# Altium footprint library AudioMoth 1.1.PCBLIB: 193 footprints (part 8 of 13)
Each footprint in its own frame and in the unit in brackets; x right, y up, seen from the top. Pads: shape width x height; smd on the part's side, far side on the other; paste and mask are expansions set on the pad; w line width, h text height; cw(c..) or ccw(c..) is an arc to the next point about the centre after c.
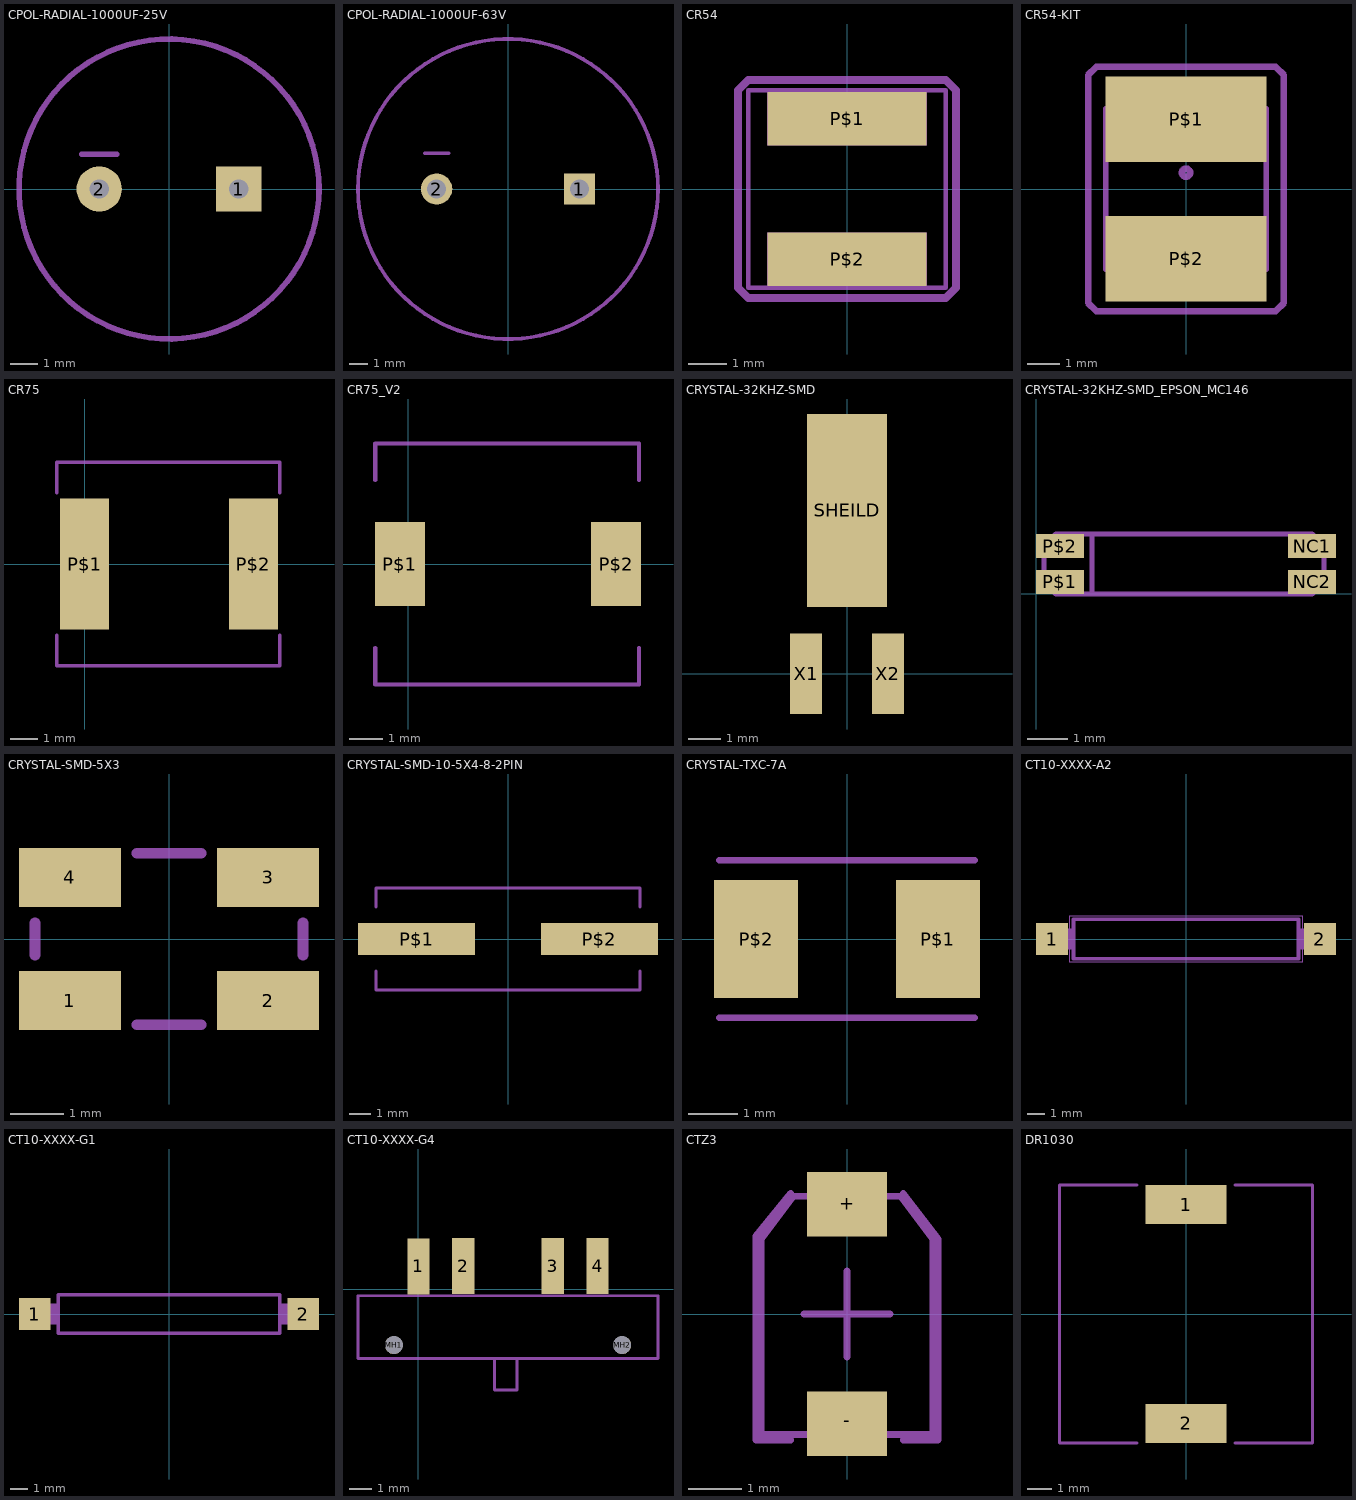
[diagram p7: the footprints below, top view; thin cyan lines are the x and y axes]

## CPOL-RADIAL-1000UF-25V [mil]
pads (2):
  rect 65x65 / inner round 60.05 / far side rect 65x65 hole 27.56: 1(100,0)
  round 65 hole 27.56: 2(-100,0)
tPlace:
  circle w8: c0,0 r215
  lines w8: -125,50 -75,50

## CPOL-RADIAL-1000UF-63V [mil]
pads (2):
  rect 65x65 / inner round 60.05 / far side rect 65x65 hole 40: 1(150,0)
  round 66 hole 40: 2(-150,0)
tPlace:
  circle w8: c0,0 r315
  lines w8: -175,75 -125,75

## CR54 [mm]
pads (2):
  rect 4.2x1.4 smd: P$1(0,1.85) P$2(0,-1.85)
tDocu:
  region: -2.1,1.15 -2.1,2.55 2.1,2.55 2.1,1.15
  region: -2.1,-2.55 -2.1,-1.15 2.1,-1.15 2.1,-2.55
  lines w0.127: -2.6,-2.6 -2.6,2.6 2.6,2.6 2.6,-2.6 -2.6,-2.6
tPlace:
  lines w0.203: -2.87,-2.6 -2.87,2.6 -2.6,2.87 2.6,2.87 2.87,2.6 2.87,-2.6 2.6,-2.87 -2.6,-2.87 -2.87,-2.6

## CR54-KIT [mm]
pads (2):
  rect 5x2.65 smd: P$1(0,2.17) P$2(0,-2.17)
tDocu:
  lines w0.178: -2.5,-2.5 -2.5,2.5 2.5,2.5 2.5,-2.5 -2.5,-2.5
tPlace:
  circle w0.203: c0,0.508 r0.127
  lines w0.203: -3.048,-3.548 -2.794,-3.802 2.794,-3.802 3.048,-3.548 3.048,3.548 2.794,3.802 -2.794,3.802 -3.048,3.548 -3.048,-3.548

## CR75 [mm]
pads (2):
  rect 1.75x4.7 smd: P$1(0,0) P$2(6.05,0)
tPlace:
  lines w0.127: -1,-2.55 -1,-3.65 7,-3.65 7,-2.55 ; -1,2.55 -1,3.65 7,3.65 7,2.55

## CR75_V2 [mil]
pads (2):
  rect 60x100 smd: P$1(-10,0) P$2(248.19,0)
tPlace:
  lines w5: -39.37,-100.39 -39.37,-143.7 275.59,-143.7 275.59,-100.39 ; -39.37,100.39 -39.37,143.7 275.59,143.7 275.59,100.39

## CRYSTAL-32KHZ-SMD [mm]
pads (3):
  rect 2.5x6 smd: SHEILD(0,5.08)
  rect 1x2.5 smd: X1(-1.27,0) X2(1.27,0)

## CRYSTAL-32KHZ-SMD_EPSON_MC146 [mm]
pads (4):
  rect 1.2x0.6 smd: NC1(6.9,1.2) NC2(6.9,0.3) P$1(0.6,0.3) P$2(0.6,1.2)
tDocu:
  lines w0.127: 0.2,0.3 0.5,0 6.9,0 7.2,0.3 7.2,1.2 6.9,1.5 0.5,1.5 0.2,1.2 0.2,0.3
tPlace:
  lines w0.127: 6.1,0 1.4,0 1.4,1.5 6.1,1.5

## CRYSTAL-SMD-5X3 [mm]
pads (4):
  rect 1.9x1.1 smd: 1(-1.85,-1.15) 2(1.85,-1.15) 3(1.85,1.15) 4(-1.85,1.15)
tPlace:
  lines w0.203: -2.5,-0.3 -2.5,0.3 ; -0.6,-1.6 0.6,-1.6 ; -0.6,1.6 0.6,1.6 ; 2.5,-0.3 2.5,0.3

## CRYSTAL-SMD-10-5X4-8-2PIN [mm]
pads (2):
  rect 5.5x1.5 smd: P$1(-4.3,0) P$2(4.3,0)
tPlace:
  lines w0.127: -6.2,-1.5 -6.2,-2.4 6.2,-2.4 6.2,-1.5 ; -6.2,1.5 -6.2,2.4 6.2,2.4 6.2,1.5

## CRYSTAL-TXC-7A [mm]
pads (2):
  rect 1.7x2.4 smd: P$1(1.85,0) P$2(-1.85,0)
tPlace:
  lines w0.127: -2.6,-1.6 2.6,-1.6 ; -2.6,1.6 2.6,1.6

## CT10-XXXX-A2 [mm]
pads (2):
  rect 1.8x1.8 smd: 1(-7.5,0) 2(7.5,0)
Dimension:
  lines w0: -6.5,-1.3 -6.5,1.3 6.5,1.3 6.5,-1.3 -6.5,-1.3
tDocu:
  region: -7.85,-0.575 -7.85,0.575 -6.25,0.575 -6.25,-0.575
  region: 6.3,-0.575 6.3,0.575 7.85,0.575 7.85,-0.575
tPlace:
  lines w0.203: -6.3,1.1 -6.3,-1.1 6.3,-1.1 6.3,1.1 -6.275,1.1

## CT10-XXXX-G1 [mm]
pads (2):
  rect 1.8x1.8 smd: 1(-7.625,0) 2(7.625,0)
tDocu:
  region: -8.2,-0.575 -8.2,0.575 -6.4,0.575 -6.4,-0.575
  region: 6.4,-0.575 6.4,0.575 8.2,0.575 8.2,-0.575
tPlace:
  lines w0.203: -6.3,1.1 -6.3,-1.1 6.3,-1.1 6.3,1.1 -6.275,1.1

## CT10-XXXX-G4 [mm]
pads (6):
  rect 1x2.5 smd: 1(0,1.01) 2(2,1.025) 3(6,1.025) 4(8,1.025)
  round 0.8 hole 0.8 unplated: MH1(-1.1,-2.5) MH2(9.1,-2.5)
tPlace:
  lines w0.127: 3.4,-3.1 4.4,-3.1 ; 3.4,-3.1 -2.7,-3.1 -2.7,-0.3 10.7,-0.3 10.7,-3.1 4.4,-3.1 ; 3.4,-3.1 3.4,-4.5 4.4,-4.5 4.4,-3.1

## CTZ3 [mm]
pads (2):
  rect 1.5x1.2 smd: +(0,2.05) -(0,-2.05)
tDocu:
  lines w0.127: -0.8,0 0.8,0 ; -0.5,0 0.5,0 ; 0,-0.8 0,0.8 ; -1.6,-2.25 -1.6,1.4 -1,2.2 1,2.2 1.6,1.4 1.6,-2.25 -1.6,-2.25
tPlace:
  lines w0.127: -1.05,-2.35 -1.7,-2.35 -1.7,1.45 -1.05,2.25 ; 1.05,-2.35 1.7,-2.35 1.7,1.4 1.05,2.25

## DR1030 [mm]
pads (2):
  rect 3.3x1.6 smd: 1(0,4.45) 2(0,-4.45)
tPlace:
  lines w0.127: -2,-5.25 -5.15,-5.25 -5.15,5.25 -2,5.25 ; 2,-5.25 5.15,-5.25 5.15,5.25 2,5.25